# Altium schematic symbol library TN1215-600G.SchLib: 1 symbol
Pins are listed as number, name and electrical type; pins without a type are passive.

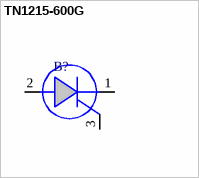
[diagram p0: symbol TN1215-600G]

## TN1215-600G
designator B?
12A standard SCRs; Manufacturer_Name: STMicroelectronics; Geometry.Height: 4.83mm; Mouser Part Number: 511-TN1215-600G; Mouser Price/Stock: https://www.mouser.co.uk/ProductDetail/STMicroelectronics/TN1215-600G?qs=lDh9v96ogBZTCD0WccrzTw%3D%3D; Manufacturer_Part_Number: TN1215-600G; Datasheet Link: https://www.st.com/resource/en/datasheet/tyn1012.pdf
footprint TN1215600G
pins: 1 K, 2 A, 3 G